# Altium footprint library PcbLib1.PcbLib: 26 footprints (part 2 of 2)
Each footprint in its own frame and in the unit in brackets; x right, y up, seen from the top. Pads: shape width x height; smd on the part's side, far side on the other; paste and mask are expansions set on the pad; w line width, h text height; cw(c..) or ccw(c..) is an arc to the next point about the centre after c.
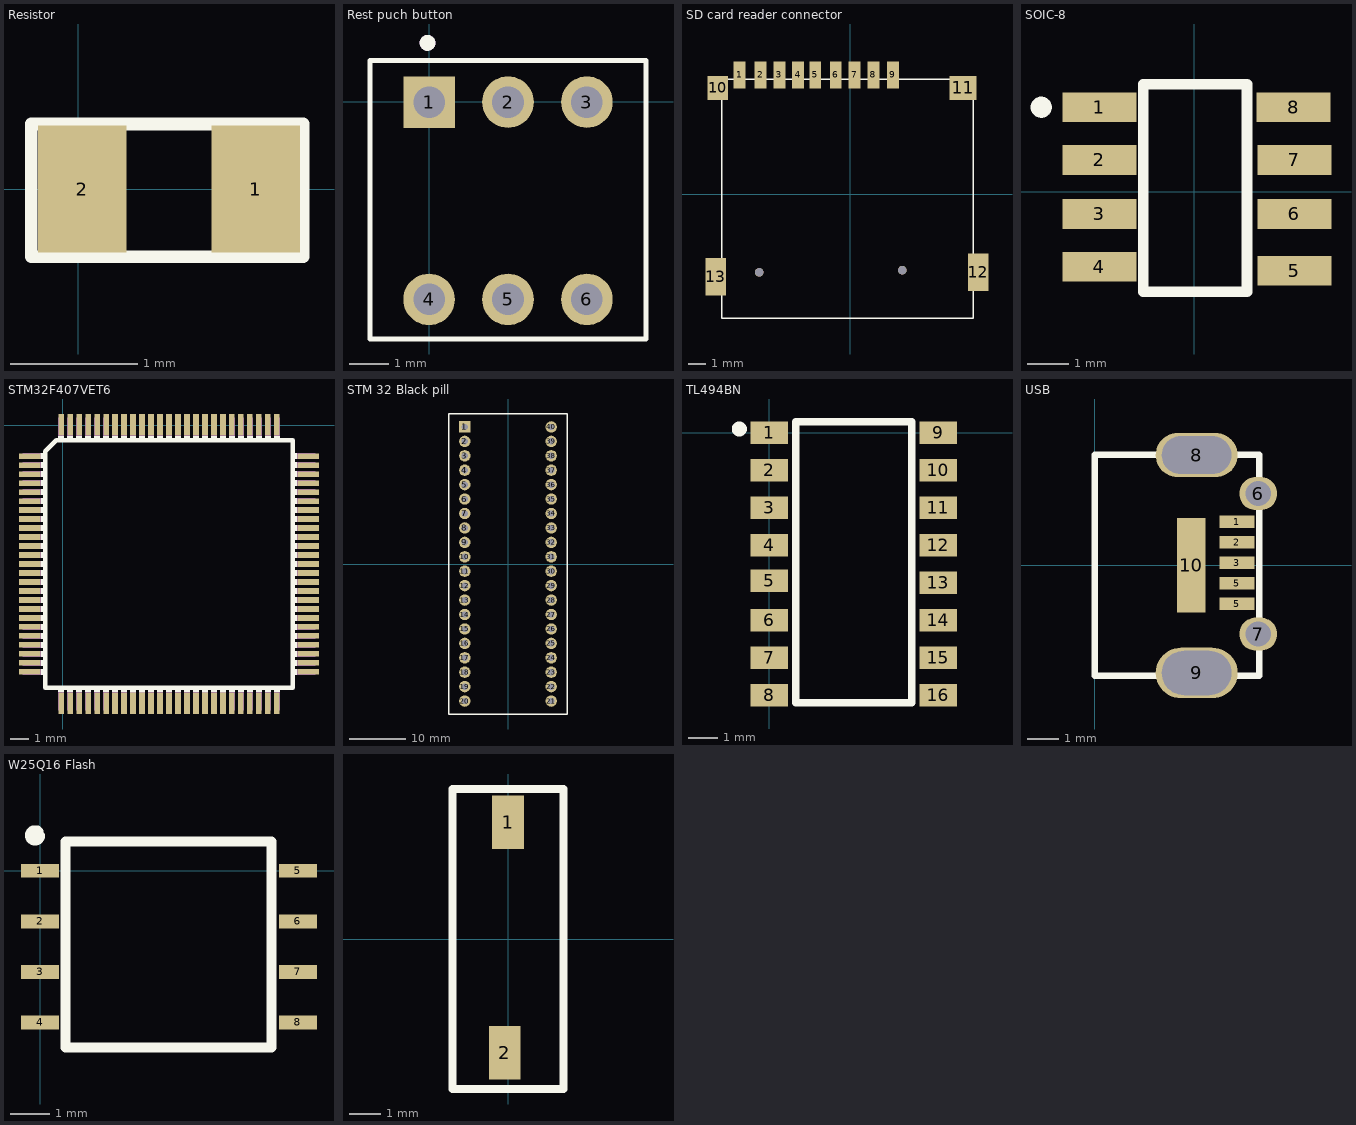
[diagram p1: the footprints below, top view; thin cyan lines are the x and y axes]

## Resistor [mm]
pads (2):
  rect 0.7x1 smd paste-2539.97 mask-2539.97: 1(1.4,0) 2(0.032,0)
Top Overlay:
  lines w0.1: -0.372,-0.533 1.774,-0.533 1.774,0.513 -0.372,0.513 -0.372,-0.533
Top Paste:
  region: 1.05,-0.5 1.05,0.5 1.75,0.5 1.75,-0.5
  region: -0.318,-0.5 -0.318,0.5 0.382,0.5 0.382,-0.5
Top Solder:
  region: 0.95,-0.55 0.95,0.55 1.85,0.55 1.85,-0.55
  region: -0.418,-0.55 -0.418,0.55 0.482,0.55 0.482,-0.55

## Rest puch button [mm]
pads (6):
  rect 1.308x1.308 / inner round 1.308 / far side rect 1.308x1.308 hole 0.8 mask+0.102: 1(0.002,-0.011)
  round 1.308 hole 0.8 mask+0.102: 2(2.002,-0.011) 3(4.002,-0.011) 4(0.002,-5.011) 5(2.002,-5.011) 6(4.002,-5.011)
Top Overlay:
  circle w0.2: c-0.038,1.489 r0.1
  lines w0.127: -0.998,-6.011 -1.498,-6.011 -1.498,1.045 -0.919,1.045 5.05,1.045 ; -0.955,-6.015 5.014,-6.015 ; 5.002,-6.011 5.502,-6.011 ; 5.002,1.045 5.502,1.045 5.502,-6.011 ; 5.502,0.989 5.502,-6.011
Mechanical 13:
  circle w0.2: c-0.038,1.489 r0.1

## SD card reader connector [mm]
pads (15):
  rect 0.7x1.6 smd paste-2539.97 mask-2539.97: 1(-6.477,6.985) 2(-5.25,6.984) 3(-4.15,6.984) 4(-3.05,6.984) 5(-2.05,6.984) 6(-0.85,6.984) 7(0.25,6.984) 8(1.35,6.984) 9(2.493,6.984)
  rect 1.2x1.4 smd paste-2539.97 mask-2539.97: 10(-7.747,6.223)
  rect 1.6x1.4 smd paste-2539.97 mask-2539.97: 11(6.604,6.223)
  round 0.5 hole 0.5: 12(-5.334,-4.572) 12(3.048,-4.445)
  rect 1.2x2.2 smd paste-2539.97 mask-2539.97: 12(7.493,-4.572) 13(-7.874,-4.826)
Top Overlay:
  lines w0.1: -7.525,-7.269 -7.525,6.731 ; -7.493,-7.269 7.207,-7.269 7.207,6.731 -7.493,6.731
Top Paste:
  region: 2.143,6.184 2.143,7.784 2.843,7.784 2.843,6.184
  region: -6.827,6.185 -6.827,7.785 -6.127,7.785 -6.127,6.185
  region: -5.6,6.184 -5.6,7.784 -4.9,7.784 -4.9,6.184
  region: -4.5,6.184 -4.5,7.784 -3.8,7.784 -3.8,6.184
  region: -8.474,-5.926 -8.474,-3.726 -7.274,-3.726 -7.274,-5.926
  region: 6.893,-5.672 6.893,-3.472 8.093,-3.472 8.093,-5.672
  region: 5.804,5.523 5.804,6.923 7.404,6.923 7.404,5.523
  region: 1,6.184 1,7.784 1.7,7.784 1.7,6.184
  region: -0.1,6.184 -0.1,7.784 0.6,7.784 0.6,6.184
  region: -1.2,6.184 -1.2,7.784 -0.5,7.784 -0.5,6.184
  region: -2.4,6.184 -2.4,7.784 -1.7,7.784 -1.7,6.184
  region: -3.4,6.184 -3.4,7.784 -2.7,7.784 -2.7,6.184
  region: -8.347,5.523 -8.347,6.923 -7.147,6.923 -7.147,5.523
Top Solder:
  region: 2.043,6.084 2.043,7.884 2.943,7.884 2.943,6.084
  region: -6.927,6.085 -6.927,7.885 -6.027,7.885 -6.027,6.085
  region: -5.7,6.084 -5.7,7.884 -4.8,7.884 -4.8,6.084
  region: -4.6,6.084 -4.6,7.884 -3.7,7.884 -3.7,6.084
  region: -8.574,-6.026 -8.574,-3.626 -7.174,-3.626 -7.174,-6.026
  region: 6.843,-5.772 6.843,-3.372 8.143,-3.372 8.143,-5.772
  region: 5.704,5.423 5.704,7.023 7.504,7.023 7.504,5.423
  region: 0.9,6.084 0.9,7.884 1.8,7.884 1.8,6.084
  region: -0.2,6.084 -0.2,7.884 0.7,7.884 0.7,6.084
  region: -1.3,6.084 -1.3,7.884 -0.4,7.884 -0.4,6.084
  region: -2.5,6.084 -2.5,7.884 -1.6,7.884 -1.6,6.084
  region: -3.5,6.084 -3.5,7.884 -2.6,7.884 -2.6,6.084
  region: -8.447,5.423 -8.447,7.023 -7.047,7.023 -7.047,5.423

## SOIC-8 [mm]
pads (8):
  rect 1.78x0.72 smd paste-2539.97 mask-2539.97: 1(-2.286,2.032) 2(-2.286,0.762) 3(-2.286,-0.538) 4(-2.286,-1.808) 5(2.413,-1.905) 6(2.413,-0.538) 7(2.413,0.762) 8(2.394,2.032)
Top Overlay:
  circle w0.254: c-3.683,2.032 r0.127
  lines w0.254: -1.23,-2.413 -1.23,2.587 1.27,2.587 1.27,-2.413 -1.23,-2.413
Top Paste:
  region: -3.176,2.392 -1.396,2.392 -1.396,1.672 -3.176,1.672
  region: -3.176,1.122 -1.396,1.122 -1.396,0.402 -3.176,0.402
  region: -3.176,-0.178 -1.396,-0.178 -1.396,-0.898 -3.176,-0.898
  region: -3.176,-1.448 -1.396,-1.448 -1.396,-2.168 -3.176,-2.168
  region: 1.504,2.392 3.284,2.392 3.284,1.672 1.504,1.672
  region: 1.523,1.122 3.303,1.122 3.303,0.402 1.523,0.402
  region: 1.523,-0.178 3.303,-0.178 3.303,-0.898 1.523,-0.898
  region: 1.523,-1.545 3.303,-1.545 3.303,-2.265 1.523,-2.265
Top Solder:
  region: -3.286,2.457 -1.286,2.457 -1.286,1.607 -3.286,1.607
  region: -3.286,1.187 -1.286,1.187 -1.286,0.337 -3.286,0.337
  region: -3.286,-0.113 -1.286,-0.113 -1.286,-0.963 -3.286,-0.963
  region: -3.286,-1.383 -1.286,-1.383 -1.286,-2.233 -3.286,-2.233
  region: 1.394,2.457 3.394,2.457 3.394,1.607 1.394,1.607
  region: 1.413,1.187 3.413,1.187 3.413,0.337 1.413,0.337
  region: 1.413,-0.113 3.413,-0.113 3.413,-0.963 1.413,-0.963
  region: 1.413,-1.48 3.413,-1.48 3.413,-2.33 1.413,-2.33

## STM32F407VET6 [mm]
pads (100):
  rect 1.2x0.32 smd: 1(-1.849,-1.729) 2(-1.849,-2.229) 3(-1.849,-2.729) 4(-1.849,-3.229) 5(-1.849,-3.729) 6(-1.849,-4.229) 7(-1.849,-4.729) 8(-1.849,-5.229) 9(-1.849,-5.729) 10(-1.849,-6.229) 11(-1.849,-6.729) 12(-1.849,-7.229) 13(-1.849,-7.729) 14(-1.849,-8.229) 15(-1.849,-8.729) 16(-1.849,-9.229) 17(-1.849,-9.729) 18(-1.849,-10.229) 19(-1.849,-10.729) 20(-1.849,-11.229) 21(-1.849,-11.729) 22(-1.849,-12.229) 23(-1.849,-12.729) 24(-1.849,-13.229) 25(-1.849,-13.729) 51(13.651,-13.729) 52(13.651,-13.229) 53(13.651,-12.729) 54(13.651,-12.229) 55(13.651,-11.729) 56(13.651,-11.229) 57(13.651,-10.729) 58(13.651,-10.229) 59(13.651,-9.729) 60(13.651,-9.229) 61(13.651,-8.729) 62(13.651,-8.229) 63(13.651,-7.729) 64(13.651,-7.229) 65(13.651,-6.729) 66(13.651,-6.229) 67(13.651,-5.729) 68(13.651,-5.229) 69(13.651,-4.729) 70(13.651,-4.229) 71(13.651,-3.729) 72(13.651,-3.229) 73(13.651,-2.729) 74(13.651,-2.229) 75(13.651,-1.729)
  rect 0.32x1.2 smd: 26(-0.099,-15.479) 27(0.401,-15.479) 28(0.901,-15.479) 29(1.401,-15.479) 30(1.901,-15.479) 31(2.401,-15.479) 32(2.901,-15.479) 33(3.401,-15.479) 34(3.901,-15.479) 35(4.401,-15.479) 36(4.901,-15.479) 37(5.401,-15.479) 38(5.901,-15.479) 39(6.401,-15.479) 40(6.901,-15.479) 41(7.401,-15.479) 42(7.901,-15.479) 43(8.401,-15.479) 44(8.901,-15.479) 45(9.401,-15.479) 46(9.901,-15.479) 47(10.401,-15.479) 48(10.901,-15.479) 49(11.401,-15.479) 50(11.901,-15.479) 76(11.901,0.021) 77(11.401,0.021) 78(10.901,0.021) 79(10.401,0.021) 80(9.901,0.021) 81(9.401,0.021) 82(8.901,0.021) 83(8.401,0.021) 84(7.901,0.021) 85(7.401,0.021) 86(6.901,0.021) 87(6.401,0.021) 88(5.901,0.021) 89(5.401,0.021) 90(4.901,0.021) 91(4.401,0.021) 92(3.901,0.021) 93(3.401,0.021) 94(2.901,0.021) 95(2.401,0.021) 96(1.901,0.021) 97(1.401,0.021) 98(0.901,0.021) 99(0.401,0.021) 100(-0.099,0.021)
Top Overlay:
  drawing of 105 lines, arcs and shapes, not listed
Mechanical 13:
  drawing of 100 lines, arcs and shapes, not listed

## STM 32 Black pill [mm]
pads (40):
  rect 2x2 hole 1.1: 1(-7.61,24.13)
  round 2 hole 1.1: 2(-7.61,21.59) 3(-7.61,19.05) 4(-7.61,16.51) 5(-7.61,13.97) 6(-7.61,11.43) 7(-7.61,8.89) 8(-7.61,6.35) 9(-7.61,3.81) 10(-7.61,1.27) 11(-7.61,-1.27) 12(-7.61,-3.81) 13(-7.61,-6.35) 14(-7.61,-8.89) 15(-7.61,-11.43) 16(-7.61,-13.97) 17(-7.61,-16.51) 18(-7.61,-19.05) 19(-7.61,-21.59) 20(-7.61,-24.13) 21(7.61,-24.13) 22(7.61,-21.59) 23(7.61,-19.05) 24(7.61,-16.51) 25(7.61,-13.97) 26(7.61,-11.43) 27(7.61,-8.89) 28(7.61,-6.35) 29(7.61,-3.81) 30(7.61,-1.27) 31(7.61,1.27) 32(7.61,3.81) 33(7.61,6.35) 34(7.61,8.89) 35(7.61,11.43) 36(7.61,13.97) 37(7.61,16.51) 38(7.61,19.05) 39(7.61,21.59) 40(7.61,24.13)
Top Overlay:
  lines w0.254: -10.39,-26.405 10.39,-26.405 10.39,26.405 -10.39,26.405 -10.39,-26.405

## TL494BN [mm]
pads (16):
  rect 1.27x0.76 smd paste-2539.97 mask-2539.97: 1(0,0) 2(0,-1.27) 3(0,-2.54) 4(0,-3.81) 5(0,-5.01) 6(0,-6.35) 7(0,-7.62) 8(0,-8.89) 9(5.72,0) 10(5.72,-1.27) 11(5.72,-2.54) 12(5.72,-3.81) 13(5.72,-5.08) 14(5.72,-6.35) 15(5.72,-7.62) 16(5.72,-8.89)
Top Overlay:
  circle w0.254: c-1.016,0.127 r0.127
  lines w0.254: 0.889,-9.144 4.826,-9.144 4.826,0.381 0.889,0.381 0.889,-9.144
Top Paste:
  region: -0.635,-1.65 -0.635,-0.89 0.635,-0.89 0.635,-1.65
  region: -0.635,-2.92 -0.635,-2.16 0.635,-2.16 0.635,-2.92
  region: -0.635,-4.19 -0.635,-3.43 0.635,-3.43 0.635,-4.19
  region: 5.085,-4.19 5.085,-3.43 6.355,-3.43 6.355,-4.19
  region: 5.085,-2.92 5.085,-2.16 6.355,-2.16 6.355,-2.92
  region: 5.085,-0.38 5.085,0.38 6.355,0.38 6.355,-0.38
  region: -0.635,-5.39 -0.635,-4.63 0.635,-4.63 0.635,-5.39
  region: -0.635,-8 -0.635,-7.24 0.635,-7.24 0.635,-8
  region: -0.635,-6.73 -0.635,-5.97 0.635,-5.97 0.635,-6.73
  region: -0.635,-9.27 -0.635,-8.51 0.635,-8.51 0.635,-9.27
  region: 5.085,-5.46 5.085,-4.7 6.355,-4.7 6.355,-5.46
  region: 5.085,-6.73 5.085,-5.97 6.355,-5.97 6.355,-6.73
  region: 5.085,-8 5.085,-7.24 6.355,-7.24 6.355,-8
  region: 5.085,-9.27 5.085,-8.51 6.355,-8.51 6.355,-9.27
  region: -0.635,-0.38 -0.635,0.38 0.635,0.38 0.635,-0.38
  region: 5.085,-1.65 5.085,-0.89 6.355,-0.89 6.355,-1.65
Top Solder:
  region: -0.685,-1.7 -0.685,-0.84 0.685,-0.84 0.685,-1.7
  region: -0.685,-2.97 -0.685,-2.11 0.685,-2.11 0.685,-2.97
  region: -0.685,-4.24 -0.685,-3.38 0.685,-3.38 0.685,-4.24
  region: 5.035,-4.24 5.035,-3.38 6.405,-3.38 6.405,-4.24
  region: 5.035,-2.97 5.035,-2.11 6.405,-2.11 6.405,-2.97
  region: 5.035,-0.43 5.035,0.43 6.405,0.43 6.405,-0.43
  region: -0.685,-5.44 -0.685,-4.58 0.685,-4.58 0.685,-5.44
  region: -0.685,-8.05 -0.685,-7.19 0.685,-7.19 0.685,-8.05
  region: -0.685,-6.78 -0.685,-5.92 0.685,-5.92 0.685,-6.78
  region: -0.685,-9.32 -0.685,-8.46 0.685,-8.46 0.685,-9.32
  region: 5.035,-5.51 5.035,-4.65 6.405,-4.65 6.405,-5.51
  region: 5.035,-6.78 5.035,-5.92 6.405,-5.92 6.405,-6.78
  region: 5.035,-8.05 5.035,-7.19 6.405,-7.19 6.405,-8.05
  region: 5.035,-9.32 5.035,-8.46 6.405,-8.46 6.405,-9.32
  region: -0.685,-0.43 -0.685,0.43 0.685,0.43 0.685,-0.43
  region: 5.035,-1.7 5.035,-0.84 6.405,-0.84 6.405,-1.7

## USB [mm]
pads (10):
  rect 1.1x0.4 smd paste-2539.97 mask-2539.97: 1(4.5,1.377) 2(4.5,0.727) 3(4.5,0.077) 5(4.5,-1.223) 5(4.5,-0.573)
  oval 1.2x1.05 hole 0.8: 6(5.174,2.266) 7(5.174,-2.184)
  oval 2.6x1.4 hole 1.2 slot 2.2 at 0 deg: 8(3.224,3.486)
  oval 2.6x1.6 hole 1.4 slot 2.2 at 0 deg: 9(3.224,-3.414)
  rect 0.9x3 smd paste+0 mask+0.102: 10(3.05,0)
Top Overlay:
  lines w0.2: 5.2,3.5 0,3.5 0,-3.5 5.207,-3.5 5.207,3.5
Top Paste:
  region: 3.95,1.177 3.95,1.577 5.05,1.577 5.05,1.177
  region: 3.95,0.527 3.95,0.927 5.05,0.927 5.05,0.527
  region: 3.95,-0.773 3.95,-0.373 5.05,-0.373 5.05,-0.773
  region: 3.95,-1.423 3.95,-1.023 5.05,-1.023 5.05,-1.423
  region: 3.95,-0.123 3.95,0.277 5.05,0.277 5.05,-0.123
Top Solder:
  region: 3.9,1.127 3.9,1.627 5.1,1.627 5.1,1.127
  region: 3.9,0.477 3.9,0.977 5.1,0.977 5.1,0.477
  region: 3.9,-0.823 3.9,-0.323 5.1,-0.323 5.1,-0.823
  region: 3.9,-1.473 3.9,-0.973 5.1,-0.973 5.1,-1.473
  region: 3.9,-0.173 3.9,0.327 5.1,0.327 5.1,-0.173

## W25Q16 Flash [mm]
pads (8):
  rect 0.96x0.35 smd paste-2539.97 mask-2539.97: 1(0,0) 2(0,-1.27) 3(0,-2.54) 4(0,-3.81) 5(6.477,0) 6(6.477,-1.27) 7(6.477,-2.54) 8(6.477,-3.81)
Top Overlay:
  lines w0.254: -0.037,0.979 ccw(c-0.127,0.889) 0,0.889 ; 0.635,-4.445 5.815,-4.445 5.815,0.735 0.635,0.735 0.635,-4.445
Top Paste:
  region: -0.48,-0.175 -0.48,0.175 0.48,0.175 0.48,-0.175
  region: -0.48,-1.445 -0.48,-1.095 0.48,-1.095 0.48,-1.445
  region: -0.48,-2.715 -0.48,-2.365 0.48,-2.365 0.48,-2.715
  region: -0.48,-3.985 -0.48,-3.635 0.48,-3.635 0.48,-3.985
  region: 5.997,-0.175 5.997,0.175 6.957,0.175 6.957,-0.175
  region: 5.997,-1.445 5.997,-1.095 6.957,-1.095 6.957,-1.445
  region: 5.997,-2.715 5.997,-2.365 6.957,-2.365 6.957,-2.715
  region: 5.997,-3.985 5.997,-3.635 6.957,-3.635 6.957,-3.985
Top Solder:
  region: -0.53,-0.225 -0.53,0.225 0.53,0.225 0.53,-0.225
  region: -0.53,-1.495 -0.53,-1.045 0.53,-1.045 0.53,-1.495
  region: -0.53,-2.765 -0.53,-2.315 0.53,-2.315 0.53,-2.765
  region: -0.53,-4.035 -0.53,-3.585 0.53,-3.585 0.53,-4.035
  region: 5.947,-0.225 5.947,0.225 7.007,0.225 7.007,-0.225
  region: 5.947,-1.495 5.947,-1.045 7.007,-1.045 7.007,-1.495
  region: 5.947,-2.765 5.947,-2.315 7.007,-2.315 7.007,-2.765
  region: 5.947,-4.035 5.947,-3.585 7.007,-3.585 7.007,-4.035

##  [mm]
pads (2):
  rect 1x1.7 smd paste-2539.97 mask-2539.97: 1(0,3.7) 2(-0.1,-3.6)
Top Overlay:
  lines w0.254: -1.75,-4.75 1.75,-4.75 1.75,4.75 -1.75,4.75 -1.75,-4.75
Top Paste:
  region: -0.5,2.85 -0.5,4.55 0.5,4.55 0.5,2.85
  region: -0.6,-4.45 -0.6,-2.75 0.4,-2.75 0.4,-4.45
Top Solder:
  region: -0.6,2.7 -0.6,4.7 0.6,4.7 0.6,2.7
  region: -0.7,-4.6 -0.7,-2.6 0.5,-2.6 0.5,-4.6